# Altium footprint library PBL - SMD Packages.PcbLib: 144 footprints (part 5 of 9)
Each footprint in its own frame and in the unit in brackets; x right, y up, seen from the top. Pads: shape width x height; smd on the part's side, far side on the other; paste and mask are expansions set on the pad; w line width, h text height; cw(c..) or ccw(c..) is an arc to the next point about the centre after c.
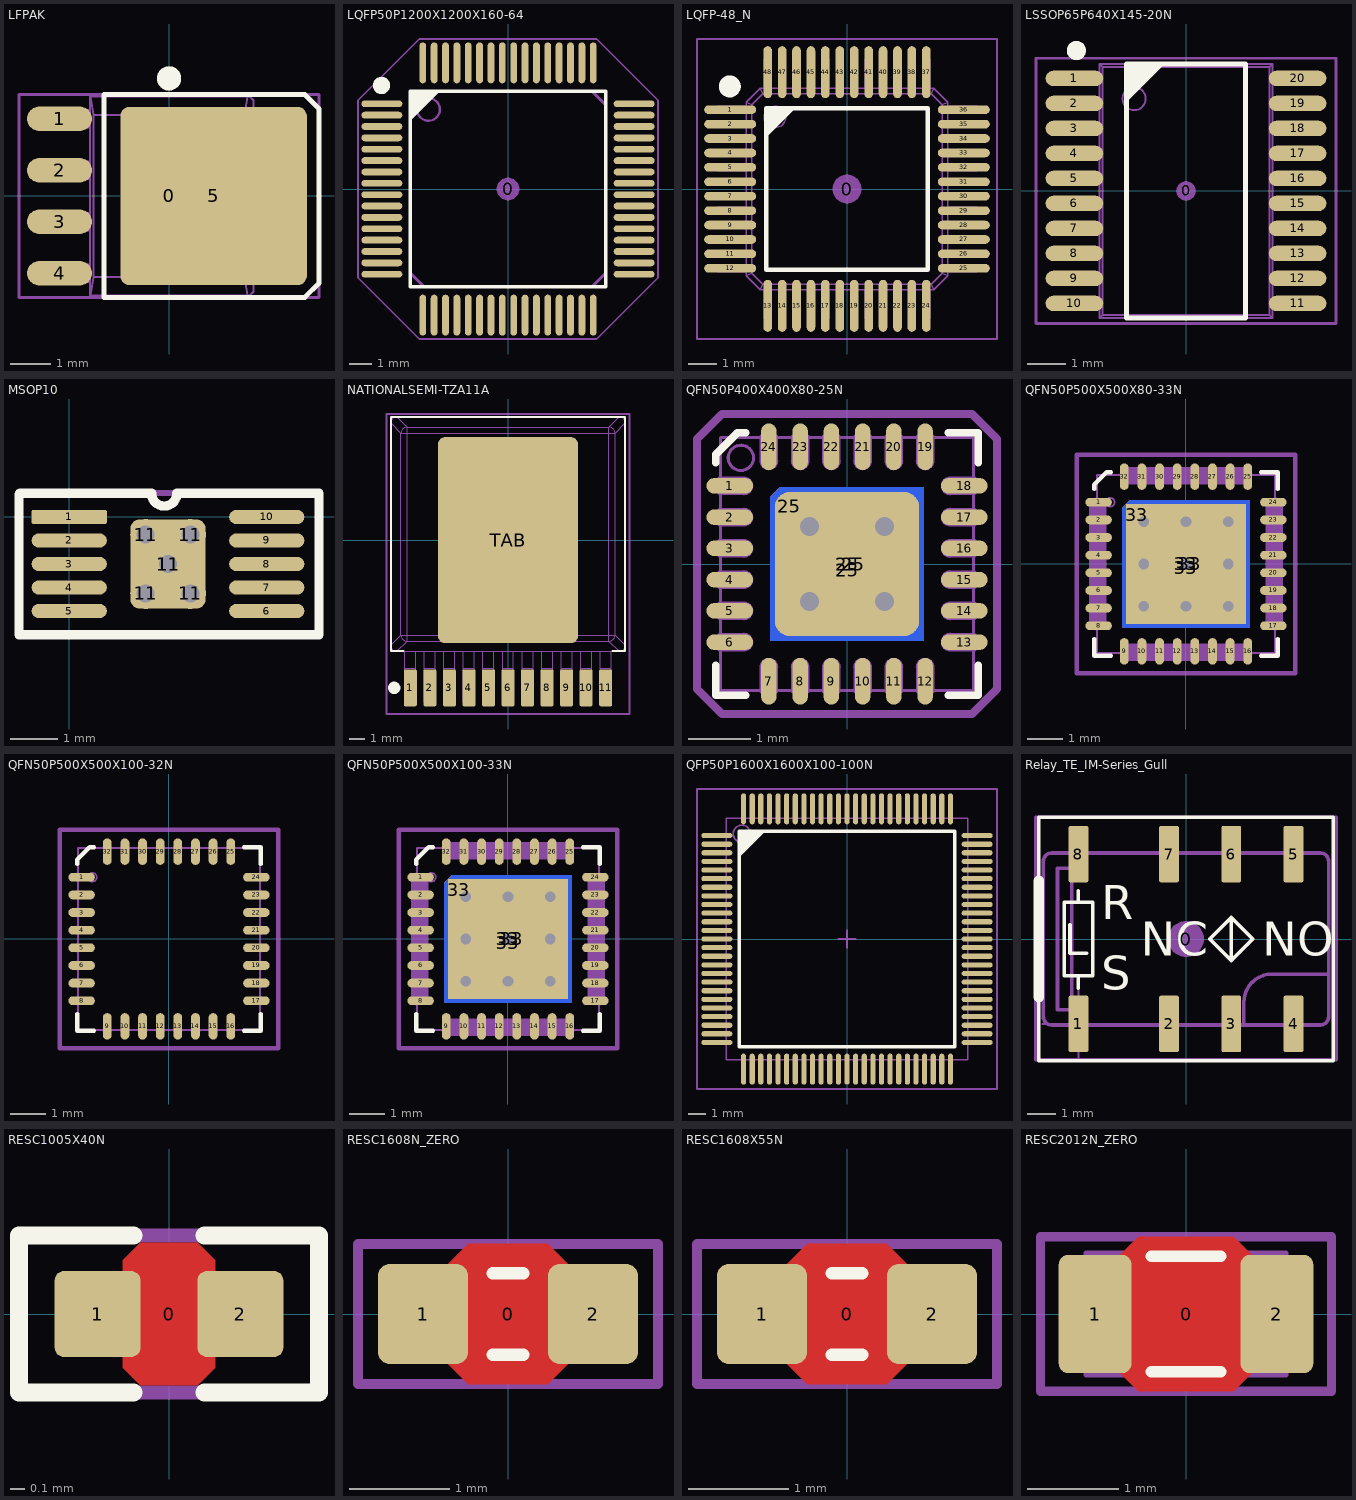
[diagram p4: the footprints below, top view; thin cyan lines are the x and y axes]

## LFPAK [mm] "Renesas LFPAK, a variant of SOIC-8; IPC Medium Density"
height 1.1
pads (6):
  round 1 on Mech15: 0(0,0)
  oval 1.6x0.6 smd: 1(-2.7,1.905) 2(-2.7,0.635) 3(-2.7,-0.635) 4(-2.7,-1.905)
  rrect10% 4.6x4.4 smd paste-0.8: 5(1.1,0)
Top Overlay:
  circle w0.3: c0,2.9 r0.15
  lines w0.127: -1.6,-2.5 -1.6,2.5 3.35,2.5 3.7,2.15 3.7,-2.15 3.35,-2.5 -1.6,-2.5
13 - 3D Top Side:
  circle w0.05: c0,1.5 r0.338
  lines w0.05: -2.631,-2.115 -2.631,-1.695 ; -2.631,-0.845 -2.631,-0.425 ; -2.631,0.425 -2.631,0.845 ; -2.631,1.695 -2.631,2.115 ; -2.543,-2.115 -2.543,-1.695 ; -2.543,-0.845 -2.543,-0.425 ; -2.543,0.425 -2.543,0.845 ; -2.543,1.695 -2.543,2.115 ; -2.506,-2.115 -2.506,-1.695 ; -2.506,-0.845 -2.506,-0.425 ; -2.506,0.425 -2.506,0.845 ; -2.506,1.695 -2.506,2.115 ; -2.217,-2.115 -2.217,-1.695 ; -2.217,-0.845 -2.217,-0.425 ; -2.217,0.425 -2.217,0.845 ; -2.217,1.695 -2.217,2.115 ; -1.95,-2.115 -3,-2.115 -3,-1.695 -1.95,-1.695 ; -1.95,-0.845 -3,-0.845 -3,-0.425 -1.95,-0.425 ; -1.95,0.425 -3,0.425 -3,0.845 -1.95,0.845 ; -1.95,1.695 -3,1.695 -3,2.115 -1.95,2.115 ; -1.937,-2.45 -1.858,-2.003 ; -1.937,2.45 -1.858,2.003 ; 1.937,-2.45 1.858,-2.003 ; 1.937,2.45 1.858,2.003 ; 2.085,-1.4 2.085,-2.358 1.993,-2.45 -1.95,-2.45 -1.95,2.45 1.993,2.45 2.085,2.358 2.085,1.4 ; 2.085,-0.6 2.085,0.6 ; -1.858,-2.003 -1.858,2.003 ; -1.858,-2.003 1.858,-2.003 ; -1.858,2.003 1.858,2.003 ; 1.858,-2.003 1.858,2.003 ; 2.028,-1.4 2.3,-1.4 2.3,-2.1 2.55,-2.1 3,-1.65 3,1.65 2.55,2.1 2.3,2.1 2.3,1.4 2.028,1.4 2.028,0.6 2.1,0.6 2.1,-0.6 2.028,-0.6 2.028,-1.4
15 - Top Courtyards:
  lines w0.076: -3.7,-2.5 -3.7,2.5 3.7,2.5 3.7,-2.5 -3.7,-2.5
3D body: height 1.1, standoff 0, extent -3,-2.45 3,2.45

## LQFP50P1200X1200X160-64 [mm] "Thin Quad Flat Pack, 64 pins, 0.5mm pitch, 12mm lead span, body 10x10mm, 0.1mm body height, max tolerances, IPC Medium Density"
height 1.6
pads (65):
  round 1 on Mech15: 0(0,0)
  oval 1.8x0.3 smd: 1(-5.55,3.75) 2(-5.55,3.25) 3(-5.55,2.75) 4(-5.55,2.25) 5(-5.55,1.75) 6(-5.55,1.25) 7(-5.55,0.75) 8(-5.55,0.25) 9(-5.55,-0.25) 10(-5.55,-0.75) 11(-5.55,-1.25) 12(-5.55,-1.75) 13(-5.55,-2.25) 14(-5.55,-2.75) 15(-5.55,-3.25) 16(-5.55,-3.75) 33(5.55,-3.75) 34(5.55,-3.25) 35(5.55,-2.75) 36(5.55,-2.25) 37(5.55,-1.75) 38(5.55,-1.25) 39(5.55,-0.75) 40(5.55,-0.25) 41(5.55,0.25) 42(5.55,0.75) 43(5.55,1.25) 44(5.55,1.75) 45(5.55,2.25) 46(5.55,2.75) 47(5.55,3.25) 48(5.55,3.75)
  oval 0.3x1.8 smd: 17(-3.75,-5.55) 18(-3.25,-5.55) 19(-2.75,-5.55) 20(-2.25,-5.55) 21(-1.75,-5.55) 22(-1.25,-5.55) 23(-0.75,-5.55) 24(-0.25,-5.55) 25(0.25,-5.55) 26(0.75,-5.55) 27(1.25,-5.55) 28(1.75,-5.55) 29(2.25,-5.55) 30(2.75,-5.55) 31(3.25,-5.55) 32(3.75,-5.55) 49(3.75,5.55) 50(3.25,5.55) 51(2.75,5.55) 52(2.25,5.55) 53(1.75,5.55) 54(1.25,5.55) 55(0.75,5.55) 56(0.25,5.55) 57(-0.25,5.55) 58(-0.75,5.55) 59(-1.25,5.55) 60(-1.75,5.55) 61(-2.25,5.55) 62(-2.75,5.55) 63(-3.25,5.55) 64(-3.75,5.55)
Top Overlay:
  circle w0.381: c-5.564,4.556 r0.191
  region: -4.294,4.294 -3.006,4.294 -4.294,3.006
  lines w0.152: -4.3,-4.3 4.3,-4.3 4.3,4.3 -4.3,4.3 -4.3,-4.3
13 - 3D Top Side:
  circle w0.1: c-3.5,3.5 r0.5
  lines w0.127: -4.3,-3.7 -3.7,-4.3 3.7,-4.3 4.3,-3.7 4.3,3.7 3.7,4.3 -3.7,4.3 -4.3,3.7 -4.3,-3.7
15 - Top Courtyards:
  lines w0.076: -6.6,-3.9 -3.9,-6.6 3.9,-6.6 6.6,-3.9 6.6,3.9 3.9,6.6 -3.9,6.6 -6.6,3.9 -6.6,-3.9
3D body: height 1.59, standoff -0.01, extent -6.1,-6.1 6.1,6.1

## LQFP-48_N [mm] "Thin QFP, 48-Leads, Body 7x7mm, Pitch 0.5mm, IPC Medium Density"
height 1.6
pads (49):
  round 1 on Mech15: 0(0,0)
  oval 1.8x0.3 smd: 1(-4.05,2.75) 2(-4.05,2.25) 3(-4.05,1.75) 4(-4.05,1.25) 5(-4.05,0.75) 6(-4.05,0.25) 7(-4.05,-0.25) 8(-4.05,-0.75) 9(-4.05,-1.25) 10(-4.05,-1.75) 11(-4.05,-2.25) 12(-4.05,-2.75) 25(4.05,-2.75) 26(4.05,-2.25) 27(4.05,-1.75) 28(4.05,-1.25) 29(4.05,-0.75) 30(4.05,-0.25) 31(4.05,0.25) 32(4.05,0.75) 33(4.05,1.25) 34(4.05,1.75) 35(4.05,2.25) 36(4.05,2.75)
  oval 0.3x1.8 smd: 13(-2.75,-4.05) 14(-2.25,-4.05) 15(-1.75,-4.05) 16(-1.25,-4.05) 17(-0.75,-4.05) 18(-0.25,-4.05) 19(0.25,-4.05) 20(0.75,-4.05) 21(1.25,-4.05) 22(1.75,-4.05) 23(2.25,-4.05) 24(2.75,-4.05) 37(2.75,4.05) 38(2.25,4.05) 39(1.75,4.05) 40(1.25,4.05) 41(0.75,4.05) 42(0.25,4.05) 43(-0.25,4.05) 44(-0.75,4.05) 45(-1.25,4.05) 46(-1.75,4.05) 47(-2.25,4.05) 48(-2.75,4.05)
Top Overlay:
  circle w0.381: c-4.064,3.556 r0.191
  region: -2.794,2.794 -1.794,2.794 -2.794,1.794
  lines w0.152: -2.794,-2.794 -2.794,2.794 2.794,2.794 2.794,-2.794 -2.794,-2.794
13 - 3D Top Side:
  drawing of 361 lines, arcs and shapes, not listed
15 - Top Courtyards:
  lines w0.076: -5.2,-5.2 -5.2,5.2 5.2,5.2 5.2,-5.2 -5.2,-5.2
3D body: height 1.59, standoff -0.01, extent -4.5,-4.5 4.5,4.5

## LSSOP65P640X145-20N [mm] "LSSOP, 20-Leads, Body 6.6x4.5mm (max), Pitch 0.65mm, IPC Medium Density"
height 1.45
pads (21):
  round 0.508 on Mech15 mask+0.127: 0(0,0)
  oval 1.5x0.4 smd paste-1 mask+0.127: 1(-2.9,2.925) 2(-2.9,2.275) 3(-2.9,1.625) 4(-2.9,0.975) 5(-2.9,0.325) 6(-2.9,-0.325) 7(-2.9,-0.975) 8(-2.9,-1.625) 9(-2.9,-2.275) 10(-2.9,-2.925) 11(2.9,-2.925) 12(2.9,-2.275) 13(2.9,-1.625) 14(2.9,-0.975) 15(2.9,-0.325) 16(2.9,0.325) 17(2.9,0.975) 18(2.9,1.625) 19(2.9,2.275) 20(2.9,2.925)
Top Overlay:
  circle w0.25: c-2.85,3.65 r0.125
  region: -1.55,3.3 -0.55,3.3 -1.55,2.3
  lines w0.127: -1.55,-3.3 -1.55,3.3 1.55,3.3 1.55,-3.3 -1.55,-3.3
Top Paste:
  region: 3.5,-0.825 2.3,-0.825 2.3,-1.125 3.5,-1.125
  region: 3.5,-0.175 2.3,-0.175 2.3,-0.475 3.5,-0.475
  region: 3.5,0.475 2.3,0.475 2.3,0.175 3.5,0.175
  region: 3.5,1.125 2.3,1.125 2.3,0.825 3.5,0.825
  region: 3.5,1.775 2.3,1.775 2.3,1.475 3.5,1.475
  region: 3.5,2.425 2.3,2.425 2.3,2.125 3.5,2.125
  region: 3.5,3.075 2.3,3.075 2.3,2.775 3.5,2.775
  rectangle: -3.5,2.775 -2.3,3.075
  rectangle: -3.5,2.125 -2.3,2.425
  rectangle: -3.5,1.475 -2.3,1.775
  rectangle: -3.5,0.825 -2.3,1.125
  rectangle: -3.5,0.175 -2.3,0.475
  rectangle: -3.5,-0.475 -2.3,-0.175
  rectangle: -3.5,-1.125 -2.3,-0.825
  rectangle: -3.5,-3.075 -2.3,-2.775
  rectangle: -3.5,-2.425 -2.3,-2.125
  rectangle: -3.5,-1.775 -2.3,-1.475
  region: 3.5,-1.475 2.3,-1.475 2.3,-1.775 3.5,-1.775
  region: 3.5,-2.125 2.3,-2.125 2.3,-2.425 3.5,-2.425
  region: 3.5,-2.775 2.3,-2.775 2.3,-3.075 3.5,-3.075
13 - 3D Top Side:
  drawing of 153 lines, arcs and shapes, not listed
15 - Top Courtyards:
  lines w0.076: -3.9,-3.45 -3.9,3.45 3.9,3.45 3.9,-3.45 -3.9,-3.45
3D body: height 1.45, standoff 0, extent -3.3,-3.3 3.3,3.3

## MSOP10 [mm]
pads (16):
  rrect25% 1.6x0.3 smd mask+0.05: 1(0,0)
  oval 1.6x0.3 smd mask+0.05: 2(0,-0.5) 3(0,-1) 4(0,-1.5) 5(0,-2) 6(4.2,-2) 7(4.2,-1.5) 8(4.2,-1) 9(4.2,-0.5) 10(4.2,0)
  round 0.66 hole 0.381: 11(1.625,-1.625) 11(1.625,-0.375) 11(2.1,-1) 11(2.575,-1.625) 11(2.575,-0.375)
  rrect25% 1.6x1.9 smd: 11(2.1,-1)
Top Overlay:
  lines w0.2: 1.725,0.5 -1.049,0.5 -1.067,0.483 -1.067,-2.5 5.309,-2.5 5.309,0.5 2.3,0.5 ; 1.75,0.5 ccw(c2.019,0.5) 2.289,0.5
Top Solder:
  rectangle: 1.175,-2.075 3.025,0.075
15 - Top Courtyards:
  lines w0.127: -1.067,-2.489 -1.067,0.508 5.309,0.508 5.309,-2.489 -1.067,-2.489
3D body: height 0.15, standoff 0, extent -0.375,-2.125 4.6,0.125
3D body: height 1.1, standoff 0, extent 0.625,-2.5 3.625,0.525

## NATIONALSEMI-TZA11A [mm] "National Semi TZA11A package"
height 6
pads (12):
  rrect25% 0.85x2.4 smd: 1(-6.35,-9.6) 2(-5.08,-9.6) 3(-3.81,-9.6) 4(-2.54,-9.6) 5(-1.27,-9.6) 6(0,-9.6) 7(1.27,-9.6) 8(2.54,-9.6) 9(3.81,-9.6) 10(5.08,-9.6) 11(6.35,-9.6)
  rrect10% 9.1x13.4 smd: TAB(0,0)
Top Overlay:
  circle w0.4: c-7.4,-9.6 r0.2
  lines w0.127: -6.8,-7.2 -7.6,-7.2 -7.6,8 7.6,8 7.6,-7.2 6.8,-7.2
13 - 3D Top Side:
  lines w0.05: -6.705,-9.644 -5.995,-9.644 ; -6.705,-9.29 -5.995,-9.29 ; -6.705,-8.865 -5.995,-8.865 ; -6.705,-8.325 -5.995,-8.325 ; -6.705,-7.235 -6.705,-10.515 -5.995,-10.515 -5.995,-7.235 ; -5.435,-9.644 -4.725,-9.644 ; -5.435,-9.29 -4.725,-9.29 ; -5.435,-8.865 -4.725,-8.865 ; -5.435,-8.325 -4.725,-8.325 ; -5.435,-7.235 -5.435,-10.515 -4.725,-10.515 -4.725,-7.235 ; -4.165,-9.644 -3.455,-9.644 ; -4.165,-9.29 -3.455,-9.29 ; -4.165,-8.865 -3.455,-8.865 ; -4.165,-8.325 -3.455,-8.325 ; -4.165,-7.235 -4.165,-10.515 -3.455,-10.515 -3.455,-7.235 ; -2.895,-9.644 -2.185,-9.644 ; -2.895,-9.29 -2.185,-9.29 ; -2.895,-8.865 -2.185,-8.865 ; -2.895,-8.325 -2.185,-8.325 ; -2.895,-7.235 -2.895,-10.515 -2.185,-10.515 -2.185,-7.235 ; -1.625,-9.644 -0.915,-9.644 ; -1.625,-9.29 -0.915,-9.29 ; -1.625,-8.865 -0.915,-8.865 ; -1.625,-8.325 -0.915,-8.325 ; -1.625,-7.235 -1.625,-10.515 -0.915,-10.515 -0.915,-7.235 ; -0.355,-9.644 0.355,-9.644 ; -0.355,-9.29 0.355,-9.29 ; -0.355,-8.865 0.355,-8.865 ; -0.355,-8.325 0.355,-8.325 ; -0.355,-7.235 -0.355,-10.515 0.355,-10.515 0.355,-7.235 ; 0.915,-9.644 1.625,-9.644 ; 0.915,-9.29 1.625,-9.29 ; 0.915,-8.865 1.625,-8.865 ; 0.915,-8.325 1.625,-8.325 ; 0.915,-7.235 0.915,-10.515 1.625,-10.515 1.625,-7.235 ; 2.185,-9.644 2.895,-9.644 ; 2.185,-9.29 2.895,-9.29 ; 2.185,-8.865 2.895,-8.865 ; 2.185,-8.325 2.895,-8.325 ; 2.185,-7.235 2.185,-10.515 2.895,-10.515 2.895,-7.235 ; 3.455,-9.644 4.165,-9.644 ; 3.455,-9.29 4.165,-9.29 ; 3.455,-8.865 4.165,-8.865 ; 3.455,-8.325 4.165,-8.325 ; 3.455,-7.235 3.455,-10.515 4.165,-10.515 4.165,-7.235 ; 4.725,-9.644 5.435,-9.644 ; 4.725,-9.29 5.435,-9.29 ; 4.725,-8.865 5.435,-8.865 ; 4.725,-8.325 5.435,-8.325 ; 4.725,-7.235 4.725,-10.515 5.435,-10.515 5.435,-7.235 ; 5.995,-9.644 6.705,-9.644 ; 5.995,-9.29 6.705,-9.29 ; 5.995,-8.865 6.705,-8.865 ; 5.995,-8.325 6.705,-8.325 ; 5.995,-7.235 5.995,-10.515 6.705,-10.515 6.705,-7.235 ; -7.625,-6.839 ccw(c-7.225,-6.835) -7.229,-7.235 ; -7.625,-6.839 -7.625,-6.835 -7.625,7.615 -7.625,7.619 ; -7.625,-6.839 -6.958,-6.172 ; -7.625,7.619 cw(c-7.225,7.615) -7.229,8.015 ; -7.625,7.619 -6.958,6.952 ; -7.229,-7.235 -7.225,-7.235 7.225,-7.235 7.229,-7.235 ; -7.229,-7.235 -6.562,-6.568 ; -7.229,8.015 -7.225,8.015 7.225,8.015 7.229,8.015 ; -7.229,8.015 -6.562,7.348 ; -6.958,-6.172 ccw(c-6.553,-6.163) -6.562,-6.568 ; -6.958,-6.172 -6.958,6.952 ; -6.958,-6.172 6.958,-6.172 ; -6.958,6.952 cw(c-6.553,6.943) -6.562,7.348 ; -6.958,6.952 6.958,6.952 ; -6.562,-6.568 -6.562,7.348 ; -6.562,-6.568 6.562,-6.568 ; -6.562,7.348 6.562,7.348 ; 6.562,-6.568 ccw(c6.553,-6.163) 6.958,-6.172 ; 6.562,-6.568 7.229,-7.235 ; 6.562,-6.568 6.562,7.348 ; 6.562,7.348 cw(c6.553,6.943) 6.958,6.952 ; 6.562,7.348 7.229,8.015 ; 6.958,-6.172 7.625,-6.839 ; 6.958,-6.172 6.958,6.952 ; 6.958,6.952 7.625,7.619 ; 7.229,-7.235 ccw(c7.225,-6.835) 7.625,-6.839 ; 7.229,8.015 cw(c7.225,7.615) 7.625,7.619 ; 7.625,-6.839 7.625,-6.835 7.625,7.615 7.625,7.619
15 - Top Courtyards:
  lines w0.127: -7.9,-11.3 -7.9,8.2 7.9,8.2 7.9,-11.3 -7.9,-11.3
3D body: height 6, standoff 0, extent -7.625,-10.515 7.625,8.015

## QFN50P400X400X80-25N [mm] "QFN, 24-Leads with exposed die pad, Body 4.05x4.05mm (max), Pitch 0.50mm, IPC Medium Density"
height 0.8
pads (28):
  oval 0.75x0.25 smd mask+0.075: 1(-1.875,1.25) 2(-1.875,0.75) 3(-1.875,0.25) 4(-1.875,-0.25) 5(-1.875,-0.75) 6(-1.875,-1.25) 13(1.875,-1.25) 14(1.875,-0.75) 15(1.875,-0.25) 16(1.875,0.25) 17(1.875,0.75) 18(1.875,1.25)
  oval 0.25x0.75 smd mask+0.075: 7(-1.25,-1.875) 8(-0.75,-1.875) 9(-0.25,-1.875) 10(0.25,-1.875) 11(0.75,-1.875) 12(1.25,-1.875) 19(1.25,1.875) 20(0.75,1.875) 21(0.25,1.875) 22(-0.25,1.875) 23(-0.75,1.875) 24(-1.25,1.875)
  oct 0.6x0.6 smd far side paste-1.7: 25(-0.925,0.925)
  rrect1% 2.45x2.25 smd far side paste-1.7: 25(0,-0.1)
  rrect20% 2.3x2.3 smd paste-1.7: 25(0,0)
  rrect1% 2.25x2.45 smd far side paste-1.7: 25(0.1,0)
via -0.6,-0.6 diameter 0.4 hole 0.3
via 0.6,-0.6 diameter 0.4 hole 0.3
via 0.6,0.6 diameter 0.4 hole 0.3
via -0.6,0.6 diameter 0.4 hole 0.3
Top Layer:
  region: 1.025,-1.225 1.225,-1.225 1.225,1.225 1.025,1.225
  region: 1.225,-1.225 1.225,-1.025 -1.225,-1.025 -1.225,-1.225
  region: -1.225,1.075 -1.075,1.225 1.225,1.225 1.225,1.075
  region: -1.075,1.225 -1.225,1.075 -1.225,-1.225 -1.075,-1.225
Top Overlay:
  lines w0.127: -2.1,-1.625 -2.1,-2.1 -1.625,-2.1 ; -2.1,1.625 -2.1,1.75 -1.75,2.1 -1.625,2.1 ; 1.625,-2.1 2.1,-2.1 2.1,-1.625 ; 1.625,2.1 2.1,2.1 2.1,1.625
  text "." at -2.63,1.25 h0.05
Top Paste:
  region: -1.1,-0.3 -1.1,0.3 -1,0.4 -0.5,0.4 -0.4,0.5 -0.4,1 -0.3,1.1 0.3,1.1 0.4,1 0.4,0.5 0.5,0.4 1,0.4 1.1,0.3 1.1,-0.3 1,-0.4 0.5,-0.4 0.4,-0.5 0.4,-1 0.3,-1.1 -0.3,-1.1 -0.4,-1 -0.4,-0.5 -0.5,-0.4 -1,-0.4
Bottom Paste:
  region: 0.2,1 -0.2,1 -0.4,0.8 -0.4,0.5 -0.5,0.4 -0.8,0.4 -1,0.2 -1,-0.2 -0.8,-0.4 -0.5,-0.4 -0.4,-0.5 -0.4,-0.8 -0.2,-1 0.2,-1 0.4,-0.8 0.4,-0.5 0.5,-0.4 0.8,-0.4 1,-0.2 1,0.2 0.8,0.4 0.5,0.4 0.4,0.5 0.4,0.8
Top Solder:
  circle w0.4: c-0.6,-0.6 r0.4
  circle w0.4: c0.6,-0.6 r0.4
  circle w0.4: c0.6,0.6 r0.4
  circle w0.4: c-0.6,0.6 r0.4
  rectangle: -0.3,-1.225 0.3,1.2
  region: 1.225,-0.3 1.225,0.3 -1.2,0.3 -1.2,-0.3
13 - 3D Top Side:
  circle w0.05: c-1.698,1.698 r0.202
  lines w0.05: -2.025,-1.375 -2.025,-2.025 -1.375,-2.025 ; -2.025,-1.125 -2.025,-0.875 ; -2.025,-0.625 -2.025,-0.375 ; -2.025,-0.125 -2.025,0.125 ; -2.025,0.375 -2.025,0.625 ; -2.025,0.875 -2.025,1.125 ; -2.025,1.375 -2.025,2.025 -1.375,2.025 ; -1.125,-2.025 -0.875,-2.025 ; -1.125,2.025 -0.875,2.025 ; -0.625,-2.025 -0.375,-2.025 ; -0.625,2.025 -0.375,2.025 ; -0.125,-2.025 0.125,-2.025 ; -0.125,2.025 0.125,2.025 ; 0.375,-2.025 0.625,-2.025 ; 0.375,2.025 0.625,2.025 ; 0.875,-2.025 1.125,-2.025 ; 0.875,2.025 1.125,2.025 ; 1.375,-2.025 2.025,-2.025 2.025,-1.375 ; 1.375,2.025 2.025,2.025 2.025,1.375 ; 2.025,-1.125 2.025,-0.875 ; 2.025,-0.625 2.025,-0.375 ; 2.025,-0.125 2.025,0.125 ; 2.025,0.375 2.025,0.625 ; 2.025,0.875 2.025,1.125 ; -2.045,-1.375 -1.65,-1.375 ccw(c-1.65,-1.25) -1.65,-1.125 -2.045,-1.125 -2.045,-1.375 ; -2.045,-0.875 -1.65,-0.875 ccw(c-1.65,-0.75) -1.65,-0.625 -2.045,-0.625 -2.045,-0.875 ; -2.045,-0.375 -1.65,-0.375 ccw(c-1.65,-0.25) -1.65,-0.125 -2.045,-0.125 -2.045,-0.375 ; -2.045,0.125 -1.65,0.125 ccw(c-1.65,0.25) -1.65,0.375 -2.045,0.375 -2.045,0.125 ; -2.045,0.625 -1.65,0.625 ccw(c-1.65,0.75) -1.65,0.875 -2.045,0.875 -2.045,0.625 ; -2.045,1.125 -1.65,1.125 ccw(c-1.65,1.25) -1.65,1.375 -2.045,1.375 -2.045,1.125 ; -1.375,-2.045 -1.375,-1.65 cw(c-1.25,-1.65) -1.125,-1.65 -1.125,-2.045 -1.375,-2.045 ; -1.375,1.65 ccw(c-1.25,1.65) -1.125,1.65 -1.125,2.045 -1.375,2.045 -1.375,1.65 ; -0.875,-2.045 -0.875,-1.65 cw(c-0.75,-1.65) -0.625,-1.65 -0.625,-2.045 -0.875,-2.045 ; -0.875,1.65 ccw(c-0.75,1.65) -0.625,1.65 -0.625,2.045 -0.875,2.045 -0.875,1.65 ; -0.375,-2.045 -0.375,-1.65 cw(c-0.25,-1.65) -0.125,-1.65 -0.125,-2.045 -0.375,-2.045 ; -0.375,1.65 ccw(c-0.25,1.65) -0.125,1.65 -0.125,2.045 -0.375,2.045 -0.375,1.65 ; 0.125,-2.045 0.125,-1.65 cw(c0.25,-1.65) 0.375,-1.65 0.375,-2.045 0.125,-2.045 ; 0.125,1.65 ccw(c0.25,1.65) 0.375,1.65 0.375,2.045 0.125,2.045 0.125,1.65 ; 0.625,-2.045 0.625,-1.65 cw(c0.75,-1.65) 0.875,-1.65 0.875,-2.045 0.625,-2.045 ; 0.625,1.65 ccw(c0.75,1.65) 0.875,1.65 0.875,2.045 0.625,2.045 0.625,1.65 ; 1.125,-2.045 1.125,-1.65 cw(c1.25,-1.65) 1.375,-1.65 1.375,-2.045 1.125,-2.045 ; 1.125,1.65 ccw(c1.25,1.65) 1.375,1.65 1.375,2.045 1.125,2.045 1.125,1.65 ; 1.65,-1.375 cw(c1.65,-1.25) 1.65,-1.125 2.045,-1.125 2.045,-1.375 1.65,-1.375 ; 1.65,-0.875 cw(c1.65,-0.75) 1.65,-0.625 2.045,-0.625 2.045,-0.875 1.65,-0.875 ; 1.65,-0.375 cw(c1.65,-0.25) 1.65,-0.125 2.045,-0.125 2.045,-0.375 1.65,-0.375 ; 1.65,0.125 cw(c1.65,0.25) 1.65,0.375 2.045,0.375 2.045,0.125 1.65,0.125 ; 1.65,0.625 cw(c1.65,0.75) 1.65,0.875 2.045,0.875 2.045,0.625 1.65,0.625 ; 1.65,1.125 cw(c1.65,1.25) 1.65,1.375 2.045,1.375 2.045,1.125 1.65,1.125
15 - Top Courtyards:
  lines w0.127: -2.4,-2 -2.4,2 -2,2.4 2,2.4 2.4,2 2.4,-2 2,-2.4 -2,-2.4 -2.4,-2
3D body: height 0.8, standoff 0, extent -2.045,-2.045 2.045,2.045

## QFN50P500X500X80-33N [mm] "QFN, 32-Leads with exposed die pad, Body 5.1x5.1mm (max), Pitch 0.50mm, IPC Medium Density"
height 0.8
pads (36):
  oval 0.75x0.25 smd mask+0.075: 1(-2.475,1.75) 2(-2.475,1.25) 3(-2.475,0.75) 4(-2.475,0.25) 5(-2.475,-0.25) 6(-2.475,-0.75) 7(-2.475,-1.25) 8(-2.475,-1.75) 17(2.475,-1.75) 18(2.475,-1.25) 19(2.475,-0.75) 20(2.475,-0.25) 21(2.475,0.25) 22(2.475,0.75) 23(2.475,1.25) 24(2.475,1.75)
  oval 0.25x0.75 smd mask+0.075: 9(-1.75,-2.475) 10(-1.25,-2.475) 11(-0.75,-2.475) 12(-0.25,-2.475) 13(0.25,-2.475) 14(0.75,-2.475) 15(1.25,-2.475) 16(1.75,-2.475) 25(1.75,2.475) 26(1.25,2.475) 27(0.75,2.475) 28(0.25,2.475) 29(-0.25,2.475) 30(-0.75,2.475) 31(-1.25,2.475) 32(-1.75,2.475)
  oct 0.8x0.8 smd far side paste-1.7: 33(-1.4,1.4)
  rrect1% 3.6x3.4 smd far side paste-1.7: 33(0,-0.1)
  rect 3.4x3.4 smd paste-1.7: 33(0,0)
  rrect1% 3.4x3.6 smd far side paste-1.7: 33(0.1,0)
via 0,0 diameter 0.4 hole 0.3
via 0,-1.2 diameter 0.4 hole 0.3
via 1.2,0 diameter 0.4 hole 0.3
via 0,1.2 diameter 0.4 hole 0.3
via -1.2,0 diameter 0.4 hole 0.3
via -1.2,-1.2 diameter 0.4 hole 0.3
via 1.2,-1.2 diameter 0.4 hole 0.3
via 1.2,1.2 diameter 0.4 hole 0.3
via -1.2,1.2 diameter 0.4 hole 0.3
Top Layer:
  region: -1.8,1.6 -1.6,1.8 1.8,1.8 1.8,1.6
  region: -1.6,1.8 -1.8,1.6 -1.8,-1.8 -1.6,-1.8
  region: -1.8,-1.6 -1.6,-1.8 1.8,-1.8 1.8,-1.6
  region: 1.6,-1.8 1.8,-1.6 1.8,1.8 1.6,1.8
Top Overlay:
  lines w0.127: -2.6,-2.125 -2.6,-2.6 -2.125,-2.6 ; -2.6,2.125 -2.6,2.25 -2.25,2.6 -2.125,2.6 ; 2.125,-2.6 2.6,-2.6 2.6,-2.125 ; 2.125,2.6 2.6,2.6 2.6,2.125
  text "." at -3.23,1.75 h0.05
Top Paste:
  region: -1.8,0.9 -1.7,1 -1.1,1 -1,1.1 -1,1.7 -0.9,1.8 -0.3,1.8 -0.2,1.7 -0.2,0.3 -0.3,0.2 -1.7,0.2 -1.8,0.3
  region: -0.9,-1.8 -1,-1.7 -1,-1.1 -1.1,-1 -1.7,-1 -1.8,-0.9 -1.8,-0.3 -1.7,-0.2 -0.3,-0.2 -0.2,-0.3 -0.2,-1.7 -0.3,-1.8
  region: 1.8,-0.9 1.7,-1 1.1,-1 1,-1.1 1,-1.7 0.9,-1.8 0.3,-1.8 0.2,-1.7 0.2,-0.3 0.3,-0.2 1.7,-0.2 1.8,-0.3
  region: 0.9,1.8 1,1.7 1,1.1 1.1,1 1.7,1 1.8,0.9 1.8,0.3 1.7,0.2 0.3,0.2 0.2,0.3 0.2,1.7 0.3,1.8
Top Solder:
  circle w0.4: c0,-1.2 r0.4
  circle w0.4: c1.2,0 r0.4
  circle w0.4: c0,1.2 r0.4
  circle w0.4: c-1.2,0 r0.4
  circle w0.4: c-1.2,1.2 r0.4
  circle w0.4: c1.2,1.2 r0.4
  circle w0.4: c1.2,-1.2 r0.4
  circle w0.4: c0,0 r0.4
  circle w0.4: c-1.2,-1.2 r0.4
  rectangle: -0.9,-1.8 -0.3,1.8
  region: 0.9,1.8 0.3,1.8 0.3,-1.8 0.9,-1.8
  region: -1.8,0.9 -1.8,0.3 1.8,0.3 1.8,0.9
  region: 1.8,-0.9 1.8,-0.3 -1.8,-0.3 -1.8,-0.9
Mechanical 3:
  region: 2.25,1.75 2.25,-1.75 2.75,-1.75 2.75,1.75
  region: 1.75,-2.25 -1.75,-2.25 -1.75,-2.75 1.75,-2.75
  region: -2.25,-1.75 -2.25,1.75 -2.75,1.75 -2.75,-1.75
  rectangle: -1.75,2.25 1.75,2.75
13 - 3D Top Side:
  circle w0.05: c-2.148,1.75 r0.125
  lines w0.05: -2.525,-1.875 -2.545,-1.875 -2.545,-1.625 -2.525,-1.625 ; -2.525,-1.375 -2.545,-1.375 -2.545,-1.125 -2.525,-1.125 ; -2.525,-0.875 -2.545,-0.875 -2.545,-0.625 -2.525,-0.625 ; -2.525,-0.375 -2.545,-0.375 -2.545,-0.125 -2.525,-0.125 ; -2.525,0.125 -2.545,0.125 -2.545,0.375 -2.525,0.375 ; -2.525,0.625 -2.545,0.625 -2.545,0.875 -2.525,0.875 ; -2.525,1.125 -2.545,1.125 -2.545,1.375 -2.525,1.375 ; -2.525,1.625 -2.545,1.625 -2.545,1.875 -2.525,1.875 ; -1.875,-2.525 -1.875,-2.545 -1.625,-2.545 -1.625,-2.525 ; -1.875,2.525 -1.875,2.545 -1.625,2.545 -1.625,2.525 ; -1.375,-2.525 -1.375,-2.545 -1.125,-2.545 -1.125,-2.525 ; -1.375,2.525 -1.375,2.545 -1.125,2.545 -1.125,2.525 ; -0.875,-2.525 -0.875,-2.545 -0.625,-2.545 -0.625,-2.525 ; -0.875,2.525 -0.875,2.545 -0.625,2.545 -0.625,2.525 ; -0.375,-2.525 -0.375,-2.545 -0.125,-2.545 -0.125,-2.525 ; -0.375,2.525 -0.375,2.545 -0.125,2.545 -0.125,2.525 ; 0.125,-2.525 0.125,-2.545 0.375,-2.545 0.375,-2.525 ; 0.125,2.525 0.125,2.545 0.375,2.545 0.375,2.525 ; 0.625,-2.525 0.625,-2.545 0.875,-2.545 0.875,-2.525 ; 0.625,2.525 0.625,2.545 0.875,2.545 0.875,2.525 ; 1.125,-2.525 1.125,-2.545 1.375,-2.545 1.375,-2.525 ; 1.125,2.525 1.125,2.545 1.375,2.545 1.375,2.525 ; 1.625,-2.525 1.625,-2.545 1.875,-2.545 1.875,-2.525 ; 1.625,2.525 1.625,2.545 1.875,2.545 1.875,2.525 ; 2.525,-1.875 2.545,-1.875 2.545,-1.625 2.525,-1.625 ; 2.525,-1.375 2.545,-1.375 2.545,-1.125 2.525,-1.125 ; 2.525,-0.875 2.545,-0.875 2.545,-0.625 2.525,-0.625 ; 2.525,-0.375 2.545,-0.375 2.545,-0.125 2.525,-0.125 ; 2.525,0.125 2.545,0.125 2.545,0.375 2.525,0.375 ; 2.525,0.625 2.545,0.625 2.545,0.875 2.525,0.875 ; 2.525,1.125 2.545,1.125 2.545,1.375 2.525,1.375 ; 2.525,1.625 2.545,1.625 2.545,1.875 2.525,1.875 ; -2.525,-2.525 2.525,-2.525 2.525,2.525 -2.525,2.525 -2.525,-2.525
15 - Top Courtyards:
  lines w0.127: -3.1,-3.1 -3.1,3.1 3.1,3.1 3.1,-3.1 -3.1,-3.1
3D body: height 0.8, standoff 0, extent -2.545,-2.545 2.545,2.545

## QFN50P500X500X100-32N [mm] "QFN, 32-Leads, Body 5.2x5.2mm (max), Pitch 0.50mm, IPC Medium Density"
height 1
pads (32):
  oval 0.75x0.25 smd: 1(-2.475,1.75) 2(-2.475,1.25) 3(-2.475,0.75) 4(-2.475,0.25) 5(-2.475,-0.25) 6(-2.475,-0.75) 7(-2.475,-1.25) 8(-2.475,-1.75) 17(2.475,-1.75) 18(2.475,-1.25) 19(2.475,-0.75) 20(2.475,-0.25) 21(2.475,0.25) 22(2.475,0.75) 23(2.475,1.25) 24(2.475,1.75)
  oval 0.25x0.75 smd: 9(-1.75,-2.475) 10(-1.25,-2.475) 11(-0.75,-2.475) 12(-0.25,-2.475) 13(0.25,-2.475) 14(0.75,-2.475) 15(1.25,-2.475) 16(1.75,-2.475) 25(1.75,2.475) 26(1.25,2.475) 27(0.75,2.475) 28(0.25,2.475) 29(-0.25,2.475) 30(-0.75,2.475) 31(-1.25,2.475) 32(-1.75,2.475)
Top Overlay:
  lines w0.127: -2.6,-2.125 -2.6,-2.6 -2.125,-2.6 ; -2.6,2.125 -2.6,2.25 -2.25,2.6 -2.125,2.6 ; 2.125,-2.6 2.6,-2.6 2.6,-2.125 ; 2.125,2.6 2.6,2.6 2.6,2.125
  text "." at -3.23,1.75 h0.05
Top Solder:
  region: 2.25,1.75 2.25,-1.75 2.75,-1.75 2.75,1.75
  region: 1.75,-2.25 -1.75,-2.25 -1.75,-2.75 1.75,-2.75
  region: -2.25,-1.75 -2.25,1.75 -2.75,1.75 -2.75,-1.75
  rectangle: -1.75,2.25 1.75,2.75
13 - 3D Top Side:
  circle w0.05: c-2.173,1.75 r0.125
  lines w0.05: -2.575,-1.875 -2.595,-1.875 -2.595,-1.625 -2.575,-1.625 ; -2.575,-1.375 -2.595,-1.375 -2.595,-1.125 -2.575,-1.125 ; -2.575,-0.875 -2.595,-0.875 -2.595,-0.625 -2.575,-0.625 ; -2.575,-0.375 -2.595,-0.375 -2.595,-0.125 -2.575,-0.125 ; -2.575,0.125 -2.595,0.125 -2.595,0.375 -2.575,0.375 ; -2.575,0.625 -2.595,0.625 -2.595,0.875 -2.575,0.875 ; -2.575,1.125 -2.595,1.125 -2.595,1.375 -2.575,1.375 ; -2.575,1.625 -2.595,1.625 -2.595,1.875 -2.575,1.875 ; -1.875,-2.575 -1.875,-2.595 -1.625,-2.595 -1.625,-2.575 ; -1.875,2.575 -1.875,2.595 -1.625,2.595 -1.625,2.575 ; -1.375,-2.575 -1.375,-2.595 -1.125,-2.595 -1.125,-2.575 ; -1.375,2.575 -1.375,2.595 -1.125,2.595 -1.125,2.575 ; -0.875,-2.575 -0.875,-2.595 -0.625,-2.595 -0.625,-2.575 ; -0.875,2.575 -0.875,2.595 -0.625,2.595 -0.625,2.575 ; -0.375,-2.575 -0.375,-2.595 -0.125,-2.595 -0.125,-2.575 ; -0.375,2.575 -0.375,2.595 -0.125,2.595 -0.125,2.575 ; 0.125,-2.575 0.125,-2.595 0.375,-2.595 0.375,-2.575 ; 0.125,2.575 0.125,2.595 0.375,2.595 0.375,2.575 ; 0.625,-2.575 0.625,-2.595 0.875,-2.595 0.875,-2.575 ; 0.625,2.575 0.625,2.595 0.875,2.595 0.875,2.575 ; 1.125,-2.575 1.125,-2.595 1.375,-2.595 1.375,-2.575 ; 1.125,2.575 1.125,2.595 1.375,2.595 1.375,2.575 ; 1.625,-2.575 1.625,-2.595 1.875,-2.595 1.875,-2.575 ; 1.625,2.575 1.625,2.595 1.875,2.595 1.875,2.575 ; 2.575,-1.875 2.595,-1.875 2.595,-1.625 2.575,-1.625 ; 2.575,-1.375 2.595,-1.375 2.595,-1.125 2.575,-1.125 ; 2.575,-0.875 2.595,-0.875 2.595,-0.625 2.575,-0.625 ; 2.575,-0.375 2.595,-0.375 2.595,-0.125 2.575,-0.125 ; 2.575,0.125 2.595,0.125 2.595,0.375 2.575,0.375 ; 2.575,0.625 2.595,0.625 2.595,0.875 2.575,0.875 ; 2.575,1.125 2.595,1.125 2.595,1.375 2.575,1.375 ; 2.575,1.625 2.595,1.625 2.595,1.875 2.575,1.875 ; -2.575,-2.575 2.575,-2.575 2.575,2.575 -2.575,2.575 -2.575,-2.575
15 - Top Courtyards:
  lines w0.127: -3.1,-3.1 -3.1,3.1 3.1,3.1 3.1,-3.1 -3.1,-3.1
3D body: height 1, standoff 0, extent -2.595,-2.595 2.595,2.595

## QFN50P500X500X100-33N [mm] "QFN, 32-Leads with exposed die pad, Body 5.2x5.2mm (max), Pitch 0.50mm, IPC Medium Density"
height 1
pads (36):
  oval 0.75x0.25 smd mask+0.075: 1(-2.475,1.75) 2(-2.475,1.25) 3(-2.475,0.75) 4(-2.475,0.25) 5(-2.475,-0.25) 6(-2.475,-0.75) 7(-2.475,-1.25) 8(-2.475,-1.75) 17(2.475,-1.75) 18(2.475,-1.25) 19(2.475,-0.75) 20(2.475,-0.25) 21(2.475,0.25) 22(2.475,0.75) 23(2.475,1.25) 24(2.475,1.75)
  oval 0.25x0.75 smd mask+0.075: 9(-1.75,-2.475) 10(-1.25,-2.475) 11(-0.75,-2.475) 12(-0.25,-2.475) 13(0.25,-2.475) 14(0.75,-2.475) 15(1.25,-2.475) 16(1.75,-2.475) 25(1.75,2.475) 26(1.25,2.475) 27(0.75,2.475) 28(0.25,2.475) 29(-0.25,2.475) 30(-0.75,2.475) 31(-1.25,2.475) 32(-1.75,2.475)
  oct 0.8x0.8 smd far side paste-1.7: 33(-1.4,1.4)
  rrect1% 3.6x3.4 smd far side paste-1.7: 33(0,-0.1)
  rect 3.4x3.4 smd paste-1.7: 33(0,0)
  rrect1% 3.4x3.6 smd far side paste-1.7: 33(0.1,0)
via -1.2,1.2 diameter 0.4 hole 0.3
via 1.2,1.2 diameter 0.4 hole 0.3
via 1.2,-1.2 diameter 0.4 hole 0.3
via -1.2,-1.2 diameter 0.4 hole 0.3
via -1.2,0 diameter 0.4 hole 0.3
via 0,1.2 diameter 0.4 hole 0.3
via 1.2,0 diameter 0.4 hole 0.3
via 0,-1.2 diameter 0.4 hole 0.3
via 0,0 diameter 0.4 hole 0.3
Top Layer:
  region: 1.6,-1.8 1.8,-1.6 1.8,1.8 1.6,1.8
  region: -1.8,-1.6 -1.6,-1.8 1.8,-1.8 1.8,-1.6
  region: -1.6,1.8 -1.8,1.6 -1.8,-1.8 -1.6,-1.8
  region: -1.8,1.6 -1.6,1.8 1.8,1.8 1.8,1.6
Top Overlay:
  lines w0.127: -2.6,-2.125 -2.6,-2.6 -2.125,-2.6 ; -2.6,2.125 -2.6,2.25 -2.25,2.6 -2.125,2.6 ; 2.125,-2.6 2.6,-2.6 2.6,-2.125 ; 2.125,2.6 2.6,2.6 2.6,2.125
  text "." at -3.23,1.75 h0.05
Top Paste:
  region: 0.9,1.8 1,1.7 1,1.1 1.1,1 1.7,1 1.8,0.9 1.8,0.3 1.7,0.2 0.3,0.2 0.2,0.3 0.2,1.7 0.3,1.8
  region: 1.8,-0.9 1.7,-1 1.1,-1 1,-1.1 1,-1.7 0.9,-1.8 0.3,-1.8 0.2,-1.7 0.2,-0.3 0.3,-0.2 1.7,-0.2 1.8,-0.3
  region: -0.9,-1.8 -1,-1.7 -1,-1.1 -1.1,-1 -1.7,-1 -1.8,-0.9 -1.8,-0.3 -1.7,-0.2 -0.3,-0.2 -0.2,-0.3 -0.2,-1.7 -0.3,-1.8
  region: -1.8,0.9 -1.7,1 -1.1,1 -1,1.1 -1,1.7 -0.9,1.8 -0.3,1.8 -0.2,1.7 -0.2,0.3 -0.3,0.2 -1.7,0.2 -1.8,0.3
Top Solder:
  circle w0.4: c-1.2,-1.2 r0.4
  circle w0.4: c0,0 r0.4
  circle w0.4: c1.2,-1.2 r0.4
  circle w0.4: c1.2,1.2 r0.4
  circle w0.4: c-1.2,1.2 r0.4
  circle w0.4: c-1.2,0 r0.4
  circle w0.4: c0,1.2 r0.4
  circle w0.4: c1.2,0 r0.4
  circle w0.4: c0,-1.2 r0.4
  region: 1.8,-0.9 1.8,-0.3 -1.8,-0.3 -1.8,-0.9
  region: -1.8,0.9 -1.8,0.3 1.8,0.3 1.8,0.9
  region: 0.9,1.8 0.3,1.8 0.3,-1.8 0.9,-1.8
  rectangle: -0.9,-1.8 -0.3,1.8
Mechanical 3:
  region: 2.25,1.75 2.25,-1.75 2.75,-1.75 2.75,1.75
  region: 1.75,-2.25 -1.75,-2.25 -1.75,-2.75 1.75,-2.75
  region: -2.25,-1.75 -2.25,1.75 -2.75,1.75 -2.75,-1.75
  rectangle: -1.75,2.25 1.75,2.75
13 - 3D Top Side:
  circle w0.05: c-2.173,1.75 r0.125
  lines w0.05: -2.575,-1.875 -2.595,-1.875 -2.595,-1.625 -2.575,-1.625 ; -2.575,-1.375 -2.595,-1.375 -2.595,-1.125 -2.575,-1.125 ; -2.575,-0.875 -2.595,-0.875 -2.595,-0.625 -2.575,-0.625 ; -2.575,-0.375 -2.595,-0.375 -2.595,-0.125 -2.575,-0.125 ; -2.575,0.125 -2.595,0.125 -2.595,0.375 -2.575,0.375 ; -2.575,0.625 -2.595,0.625 -2.595,0.875 -2.575,0.875 ; -2.575,1.125 -2.595,1.125 -2.595,1.375 -2.575,1.375 ; -2.575,1.625 -2.595,1.625 -2.595,1.875 -2.575,1.875 ; -1.875,-2.575 -1.875,-2.595 -1.625,-2.595 -1.625,-2.575 ; -1.875,2.575 -1.875,2.595 -1.625,2.595 -1.625,2.575 ; -1.375,-2.575 -1.375,-2.595 -1.125,-2.595 -1.125,-2.575 ; -1.375,2.575 -1.375,2.595 -1.125,2.595 -1.125,2.575 ; -0.875,-2.575 -0.875,-2.595 -0.625,-2.595 -0.625,-2.575 ; -0.875,2.575 -0.875,2.595 -0.625,2.595 -0.625,2.575 ; -0.375,-2.575 -0.375,-2.595 -0.125,-2.595 -0.125,-2.575 ; -0.375,2.575 -0.375,2.595 -0.125,2.595 -0.125,2.575 ; 0.125,-2.575 0.125,-2.595 0.375,-2.595 0.375,-2.575 ; 0.125,2.575 0.125,2.595 0.375,2.595 0.375,2.575 ; 0.625,-2.575 0.625,-2.595 0.875,-2.595 0.875,-2.575 ; 0.625,2.575 0.625,2.595 0.875,2.595 0.875,2.575 ; 1.125,-2.575 1.125,-2.595 1.375,-2.595 1.375,-2.575 ; 1.125,2.575 1.125,2.595 1.375,2.595 1.375,2.575 ; 1.625,-2.575 1.625,-2.595 1.875,-2.595 1.875,-2.575 ; 1.625,2.575 1.625,2.595 1.875,2.595 1.875,2.575 ; 2.575,-1.875 2.595,-1.875 2.595,-1.625 2.575,-1.625 ; 2.575,-1.375 2.595,-1.375 2.595,-1.125 2.575,-1.125 ; 2.575,-0.875 2.595,-0.875 2.595,-0.625 2.575,-0.625 ; 2.575,-0.375 2.595,-0.375 2.595,-0.125 2.575,-0.125 ; 2.575,0.125 2.595,0.125 2.595,0.375 2.575,0.375 ; 2.575,0.625 2.595,0.625 2.595,0.875 2.575,0.875 ; 2.575,1.125 2.595,1.125 2.595,1.375 2.575,1.375 ; 2.575,1.625 2.595,1.625 2.595,1.875 2.575,1.875 ; -2.575,-2.575 -2.575,2.575 2.575,2.575 2.575,-2.575 -2.575,-2.575
15 - Top Courtyards:
  lines w0.127: -3.1,-3.1 -3.1,3.1 3.1,3.1 3.1,-3.1 -3.1,-3.1
3D body: height 1, standoff 0, extent -2.595,-2.595 2.595,2.595

## QFP50P1600X1600X100-100N [mm] "TQFP-100, Thin QFP, 100-Leads, Body 14x14x1mm, Pitch 0.5mm, IPC Medium Density"
height 1
pads (100):
  oval 1.8x0.3 smd: 1(-7.55,6) 2(-7.55,5.5) 3(-7.55,5) 4(-7.55,4.5) 5(-7.55,4) 6(-7.55,3.5) 7(-7.55,3) 8(-7.55,2.5) 9(-7.55,2) 10(-7.55,1.5) 11(-7.55,1) 12(-7.55,0.5) 13(-7.55,0) 14(-7.55,-0.5) 15(-7.55,-1) 16(-7.55,-1.5) 17(-7.55,-2) 18(-7.55,-2.5) 19(-7.55,-3) 20(-7.55,-3.5) 21(-7.55,-4) 22(-7.55,-4.5) 23(-7.55,-5) 24(-7.55,-5.5) 25(-7.55,-6) 51(7.55,-6) 52(7.55,-5.5) 53(7.55,-5) 54(7.55,-4.5) 55(7.55,-4) 56(7.55,-3.5) 57(7.55,-3) 58(7.55,-2.5) 59(7.55,-2) 60(7.55,-1.5) 61(7.55,-1) 62(7.55,-0.5) 63(7.55,0) 64(7.55,0.5) 65(7.55,1) 66(7.55,1.5) 67(7.55,2) 68(7.55,2.5) 69(7.55,3) 70(7.55,3.5) 71(7.55,4) 72(7.55,4.5) 73(7.55,5) 74(7.55,5.5) 75(7.55,6)
  oval 0.3x1.8 smd: 26(-6,-7.55) 27(-5.5,-7.55) 28(-5,-7.55) 29(-4.5,-7.55) 30(-4,-7.55) 31(-3.5,-7.55) 32(-3,-7.55) 33(-2.5,-7.55) 34(-2,-7.55) 35(-1.5,-7.55) 36(-1,-7.55) 37(-0.5,-7.55) 38(0,-7.55) 39(0.5,-7.55) 40(1,-7.55) 41(1.5,-7.55) 42(2,-7.55) 43(2.5,-7.55) 44(3,-7.55) 45(3.5,-7.55) 46(4,-7.55) 47(4.5,-7.55) 48(5,-7.55) 49(5.5,-7.55) 50(6,-7.55) 76(6,7.55) 77(5.5,7.55) 78(5,7.55) 79(4.5,7.55) 80(4,7.55) 81(3.5,7.55) 82(3,7.55) 83(2.5,7.55) 84(2,7.55) 85(1.5,7.55) 86(1,7.55) 87(0.5,7.55) 88(0,7.55) 89(-0.5,7.55) 90(-1,7.55) 91(-1.5,7.55) 92(-2,7.55) 93(-2.5,7.55) 94(-3,7.55) 95(-3.5,7.55) 96(-4,7.55) 97(-4.5,7.55) 98(-5,7.55) 99(-5.5,7.55) 100(-6,7.55)
Top Overlay:
  region: -6.25,6.25 -4.75,6.25 -6.25,4.75
  lines w0.2: -6.25,-6.25 -6.25,6.25 6.25,6.25 6.25,-6.25 -6.25,-6.25
  text "." at -7.55,6.6 h0.05
13 - 3D Top Side:
  circle w0.1: c-6.1,6.1 r0.5
  lines w0.1: -7,-7 -7,7 7,7 7,-7 -7,-7
15 - Top Courtyards:
  lines w0.1: -0.5,0 0.5,0 ; 0,-0.5 0,0.5 ; -8.7,-8.7 -8.7,8.7 8.7,8.7 8.7,-8.7 -8.7,-8.7
3D body: height 1, standoff 0, extent -7,-7 7,7

## Relay_TE_IM-Series_Gull [mm] "TE Connectivity IM48DGR latching relay, gullwing SMD"
height 5.65
pads (9):
  round 1.27 on Mech15: 0(0,0)
  rrect20% 0.7x2 smd: 1(-3.8,-3) 2(-0.6,-3) 3(1.6,-3) 4(3.8,-3) 5(3.8,3) 6(1.6,3) 7(-0.6,3) 8(-3.8,3)
Top Overlay:
  lines w0.127: -4.1,0.5 -4.1,-0.5 -3.5,-0.5 ; -3.8,-1.73 -3.8,-1.3 ; -3.8,1.3 -3.8,1.7 ; 1.6,-0.762 0.838,0 1.6,0.762 ; 1.6,-0.762 1.6,0.762 ; 1.6,-0.762 2.362,0 1.6,0.762 ; -5.2,-4.3 -5.2,4.3 5.2,4.3 5.2,-4.3 -5.2,-4.3 ; -4.308,-1.3 -3.292,-1.3 -3.292,1.3 -4.308,1.3 -4.308,-1.3
  lines w0.381: -5.2,-2.045 -5.2,2.045
  text "S" at -3,-1.8 h1.2
  text "R" at -3,0.7 h1.2
  text "NC" at -1.6,-0.6 h1.2
  text "NO" at 2.7,-0.6 h1.2
13 - 3D Top Side:
  lines w0.127: -4,-3.04 -4,-3.755 -3.6,-3.755 -3.6,-3.04 ; -4,3.04 -4,3.755 -3.6,3.755 -3.6,3.04 ; -0.8,-3.04 -0.8,-3.755 -0.4,-3.755 -0.4,-3.04 ; -0.8,3.04 -0.8,3.755 -0.4,3.755 -0.4,3.04 ; 1.4,-3.04 1.4,-3.755 1.8,-3.755 1.8,-3.04 ; 1.4,3.04 1.4,3.755 1.8,3.755 1.8,3.04 ; 2.04,-3.04 2.04,-2.24 cw(c3.04,-2.24) 3.04,-1.24 5.04,-1.24 ; 3.6,-3.04 3.6,-3.755 4,-3.755 4,-3.04 ; 3.6,3.04 3.6,3.755 4,3.755 4,3.04 ; -5.04,-2.74 ccw(c-4.74,-2.74) -4.74,-3.04 4.74,-3.04 ccw(c4.74,-2.74) 5.04,-2.74 5.04,2.74 ccw(c4.74,2.74) 4.74,3.04 -4.74,3.04 ccw(c-4.74,2.74) -5.04,2.74 -5.04,-2.74 ; -4.54,-2.5 -4.04,-2.5 -4.04,2.5 -4.54,2.5 -4.54,-2.5
15 - Top Courtyards:
  lines w0.076: -5.07,-3 -2.53,-3 ; -3.8,-4.27 -3.8,-1.73
  lines w0.127: -5.3,-4.27 5.3,-4.27 5.3,4.3 -5.3,4.3 -5.3,-4.27
3D body: height 5.65, standoff 0, extent -5.04,-3.755 5.04,3.755

## RESC1005X40N [mm] "Chip Resistor, Body 1.0x0.5mm, EIA 0402, IPC Medium Density"
height 0.4
pads (3):
  round 0.2 on Mech15: 0(0,0)
  rrect20% 0.6x0.6 smd: 1(-0.5,0) 2(0.5,0)
Top Layer:
  pour cut-out: -0.325,0.375 -0.2,0.5 0.2,0.5 0.325,0.375 0.325,-0.375 0.2,-0.5 -0.2,-0.5 -0.325,-0.375
Top Overlay:
  lines w0.127: -0.25,-0.55 -1.05,-0.55 -1.05,0.55 -0.25,0.55 ; 0.25,-0.55 1.05,-0.55 1.05,0.55 0.25,0.55
13 - 3D Top Side:
  lines w0.05: 0.225,-0.274 -0.225,-0.274 0.225,-0.274 ; -0.525,-0.275 -0.225,-0.275 -0.225,0.275 -0.525,0.275 -0.525,-0.275 ; -0.225,0.274 0.225,0.274 -0.225,0.274 ; 0.225,-0.275 0.225,0.275 0.525,0.275 0.525,-0.275 0.225,-0.275
15 - Top Courtyards:
  lines w0.1: -1.05,-0.55 1.05,-0.55 1.05,0.55 -1.05,0.55 -1.05,-0.55
3D body: height 0.4, standoff 0, extent -0.525,-0.275 0.525,0.275

## RESC1608N_ZERO [mm] "Chip Resistor, Body 1.6x0.8mm, 0603, IPC Medium Density"
height 0.55
pads (3):
  round 0.254 on Mech15: 0(0,0)
  rrect25% 0.9x1 smd: 1(-0.85,0) 2(0.85,0)
Top Layer:
  pour cut-out: -0.6,0.5 -0.4,0.7 0.4,0.7 0.6,0.5 0.6,-0.5 0.4,-0.7 -0.4,-0.7 -0.6,-0.5
Top Overlay:
  lines w0.127: -0.152,-0.406 0.152,-0.406 ; -0.152,0.406 0.152,0.406
13 - 3D Top Side:
  lines w0.05: -0.875,-0.475 -0.875,0.475 -0.475,0.475 -0.475,-0.475 -0.875,-0.475 ; -0.475,-0.474 0.475,-0.474 -0.475,-0.474 ; -0.475,0.474 0.475,0.474 -0.475,0.474 ; 0.475,-0.475 0.875,-0.475 0.875,0.475 0.475,0.475 0.475,-0.475
15 - Top Courtyards:
  lines w0.1: -1.5,-0.7 -1.5,0.7 1.5,0.7 1.5,-0.7 -1.5,-0.7
3D body: height 0.54, standoff -0.01, extent -0.875,-0.475 0.875,0.475

## RESC1608X55N [mm] "Chip Resistor, Body 1.6x0.8mm, EIA 0603, IPC Medium Density"
height 0.55
pads (3):
  round 0.254 on Mech15: 0(0,0)
  rrect25% 0.9x1 smd: 1(-0.85,0) 2(0.85,0)
Top Layer:
  pour cut-out: -0.6,0.5 -0.4,0.7 0.4,0.7 0.6,0.5 0.6,-0.5 0.4,-0.7 -0.4,-0.7 -0.6,-0.5
Top Overlay:
  lines w0.127: -0.152,-0.406 0.152,-0.406 ; -0.152,0.406 0.152,0.406
13 - 3D Top Side:
  lines w0.05: -0.875,-0.475 -0.875,0.475 -0.475,0.475 -0.475,-0.475 -0.875,-0.475 ; -0.475,-0.474 0.475,-0.474 -0.475,-0.474 ; -0.475,0.474 0.475,0.474 -0.475,0.474 ; 0.475,-0.475 0.875,-0.475 0.875,0.475 0.475,0.475 0.475,-0.475
15 - Top Courtyards:
  lines w0.1: -1.5,-0.7 1.5,-0.7 1.5,0.7 -1.5,0.7 -1.5,-0.7
3D body: height 0.54, standoff -0.01, extent -0.875,-0.475 0.875,0.475

## RESC2012N_ZERO [mm] "Chip Resistor, Body 2.0x1.2mm, 0805, IPC Medium Density"
height 0.7
pads (3):
  round 0.254 on Mech15: 0(0,0)
  rrect25% 0.8x1.3 smd: 1(-1,0) 2(1,0)
Top Layer:
  pour cut-out: -0.725,0.65 -0.525,0.85 0.525,0.85 0.725,0.65 0.725,-0.65 0.525,-0.85 -0.525,-0.85 -0.725,-0.65
Top Overlay:
  lines w0.127: -0.381,-0.635 0.381,-0.635 ; -0.381,0.635 0.381,0.635
13 - 3D Top Side:
  lines w0.05: 0.6,-0.674 -0.6,-0.674 ; -0.6,-0.675 -0.6,0.675 -1.1,0.675 -1.1,-0.675 -0.6,-0.675 ; -0.6,-0.674 0.6,-0.674 ; 0.6,-0.675 0.6,0.675 ; 0.6,-0.675 1.1,-0.675 1.1,0.675 0.6,0.675 ; 0.6,0.674 -0.6,0.674 0.6,0.674
15 - Top Courtyards:
  lines w0.1: -1.6,-0.85 1.6,-0.85 1.6,0.85 -1.6,0.85 -1.6,-0.85
3D body: height 0.69, standoff -0.01, extent -1.1,-0.675 1.1,0.675